# Altium integrated library MSS1048-223MLB.IntLib: 1 symbol
Pins are listed as number, name and electrical type; pins without a type are passive.

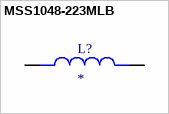
[diagram p0: symbol MSS1048-223MLB]

## MSS1048-223MLB
designator L?
MP: MSS1048-223MLB; Package: None; Price: None; Value: *; Availability: Unavailable
footprint IND_MSS1048-223MLB
pins: 1, 2